# Altium schematic symbol library ZXMHC3F381N8.SchLib: 1 symbol
Pins are listed as number, name and electrical type; pins without a type are passive.

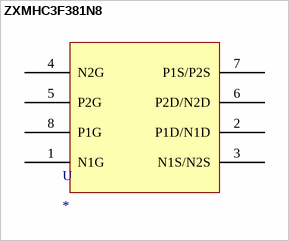
[diagram p0: symbol ZXMHC3F381N8]

## ZXMHC3F381N8
designator U
N-Channel+P-Channel Array 30V 4.1A 0.95W Surface Mount SO-8
footprint SOIC127P600X175-8N
pins: 1 N1G, 2 P1D/N1D, 3 N1S/N2S, 4 N2G, 5 P2G, 6 P2D/N2D, 7 P1S/P2S, 8 P1G